# Altium footprint library Footprints.PcbLib: 320 footprints (part 20 of 20)
Each footprint in its own frame and in the unit in brackets; x right, y up, seen from the top. Pads: shape width x height; smd on the part's side, far side on the other; paste and mask are expansions set on the pad; w line width, h text height; cw(c..) or ccw(c..) is an arc to the next point about the centre after c.
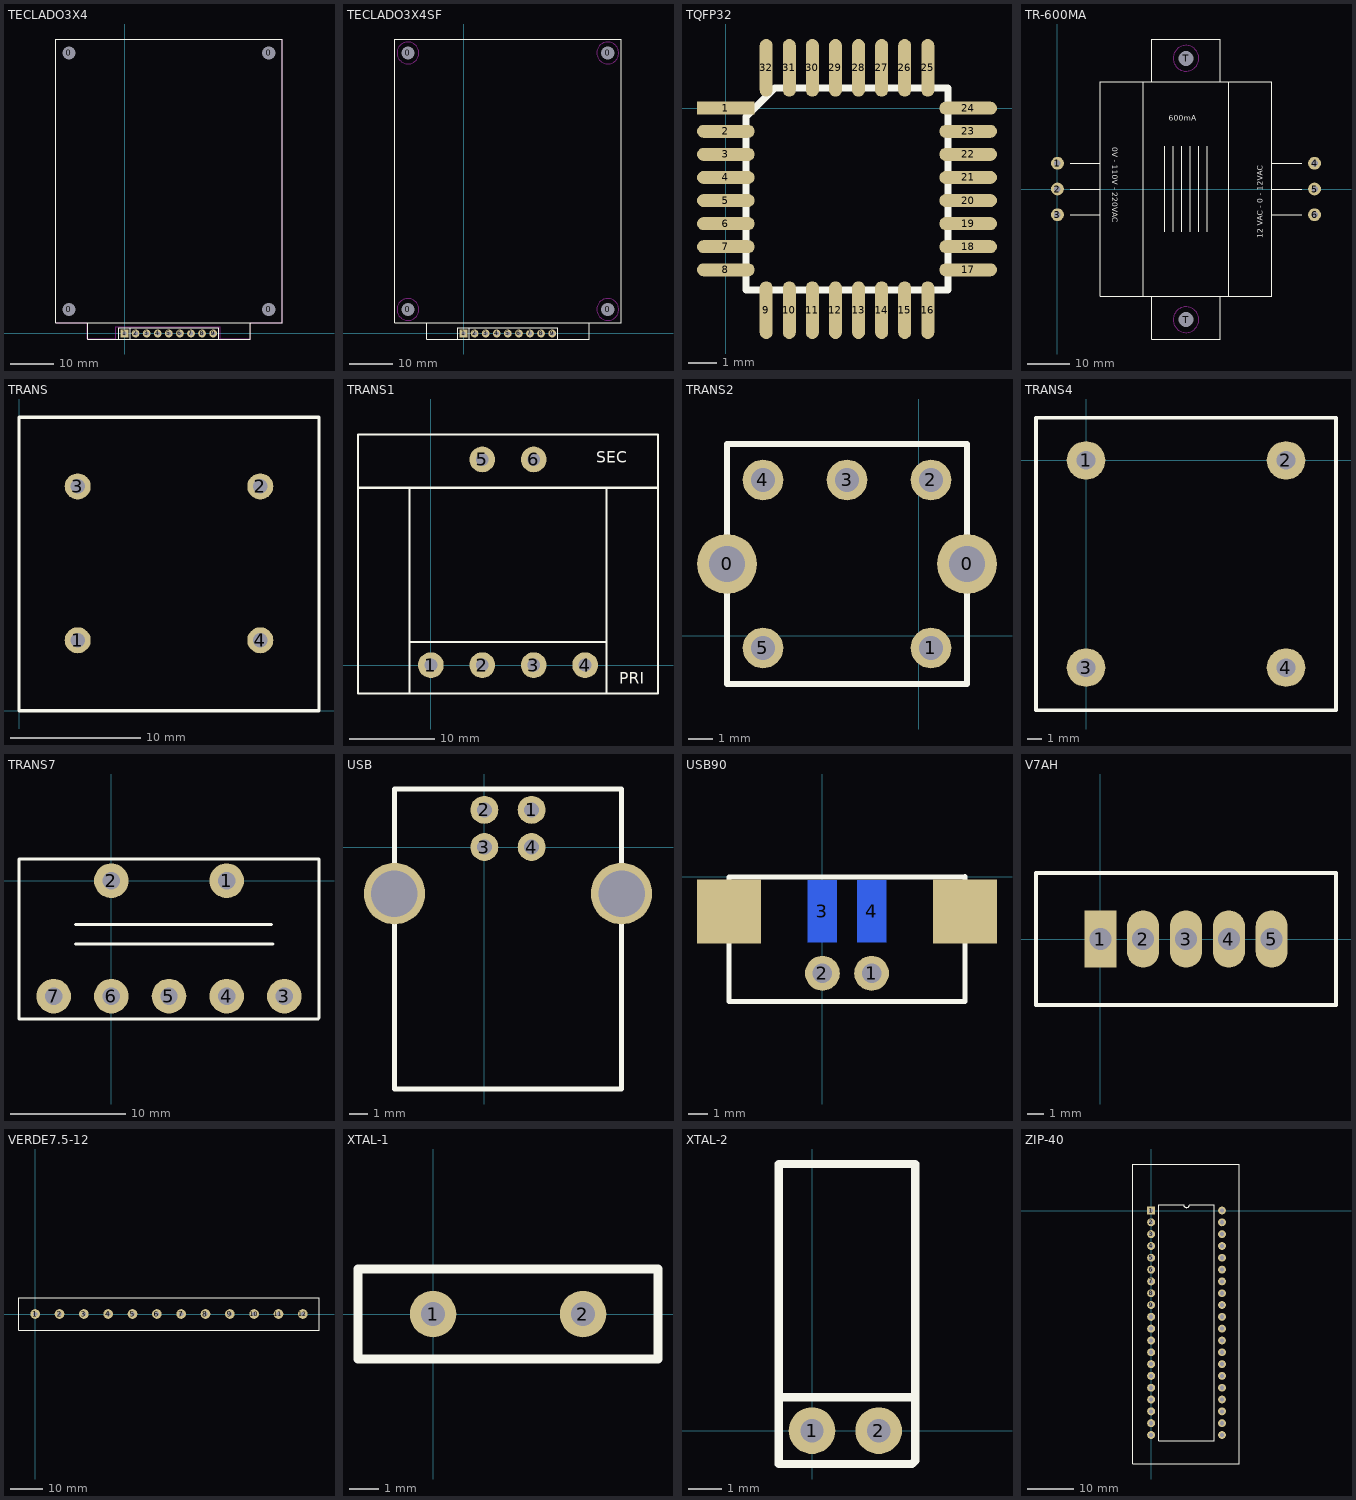
[diagram p19: the footprints below, top view; thin cyan lines are the x and y axes]

## TECLADO3X4 [mm]
pads (13):
  round 2.5 hole 3: 0(-12.74,5.5) 0(-12.74,64.3) 0(33.06,5.5) 0(33.06,64.3)
  rect 1.8x1.8 hole 1: 1(0,0)
  round 1.8 hole 1: 2(2.54,0) 3(5.08,0) 4(7.62,0) 5(10.16,0) 6(12.7,0) 7(15.24,0) 8(17.78,0) 9(20.32,0)
Top Overlay:
  lines w0.254: -8.47,2.47 -8.47,-1.27 -1.27,-1.27 ; 1.27,-1.27 1.27,1.27 ; 20.4,-1.27 28.87,-1.27 28.87,2.47 ; -1.27,-1.27 21.59,-1.27 21.59,1.27 -1.27,1.27 -1.27,-1.27 ; -15.8,2.5 36.2,2.5 36.2,67.5 -15.8,67.5 -15.8,2.5
Keep-Out Layer:
  lines w0.254: -15.8,2.5 -8.5,2.5 -8.5,-1.2 -2,-1.2 -2,1.5 22,1.5 22,-1.2 28.9,-1.2 28.9,2.5 36.2,2.5 36.2,67.5 -15.8,67.5 -15.8,2.5

## TECLADO3X4SF [mm]
pads (13):
  round 2.5 hole 3: 0(-12.74,5.5) 0(-12.74,64.3) 0(33.06,5.5) 0(33.06,64.3)
  rect 1.8x1.8 hole 1: 1(0,0)
  round 1.8 hole 1: 2(2.54,0) 3(5.08,0) 4(7.62,0) 5(10.16,0) 6(12.7,0) 7(15.24,0) 8(17.78,0) 9(20.32,0)
Top Overlay:
  lines w0.254: -8.47,2.47 -8.47,-1.27 -1.27,-1.27 ; 1.27,-1.27 1.27,1.27 ; 20.4,-1.27 28.87,-1.27 28.87,2.47 ; -1.27,-1.27 -1.27,1.27 21.59,1.27 21.59,-1.27 -1.27,-1.27 ; -15.8,2.5 -15.8,67.5 36.2,67.5 36.2,2.5 -15.8,2.5
Keep-Out Layer:
  circle w0.254: c-12.74,64.3 r2.5
  circle w0.254: c33.06,64.3 r2.5
  circle w0.254: c33.06,5.5 r2.5
  circle w0.254: c-12.74,5.5 r2.5

## TQFP32 [mm]
pads (32):
  rect 2x0.45 smd: 1(0,0)
  oval 2x0.45 smd: 2(0,-0.8) 3(0,-1.6) 4(0,-2.4) 5(0,-3.2) 6(0,-4) 7(0,-4.8) 8(0,-5.6) 17(8.4,-5.6) 18(8.4,-4.8) 19(8.4,-4) 20(8.4,-3.2) 21(8.4,-2.4) 22(8.4,-1.6) 23(8.4,-0.8) 24(8.4,0)
  oval 0.45x2 smd: 9(1.4,-7) 10(2.2,-7) 11(3,-7) 12(3.8,-7) 13(4.6,-7) 14(5.4,-7) 15(6.2,-7) 16(7,-7) 25(7,1.4) 26(6.2,1.4) 27(5.4,1.4) 28(4.6,1.4) 29(3.8,1.4) 30(3,1.4) 31(2.2,1.4) 32(1.4,1.4)
Top Overlay:
  lines w0.254: 0.7,-0.3 0.7,-6.3 7.7,-6.3 7.7,0.7 1.7,0.7 0.7,-0.3 ; 0.7,-0.3 0.7,-0.3

## TR-600MA [mm]
pads (8):
  round 3 hole 1.5: 1(0,6) 2(0,0) 3(0,-6) 4(60,6) 5(60,0) 6(60,-6)
  round 3 hole 3.5: T(30,-30.5) T(30,30.5)
Top Overlay:
  lines w0.254: 3,-6 9.9,-6 ; 3,0 10,0 ; 3,6 10,6 ; 20,-25 20,25 ; 22,-25 22,-35 38,-35 38,-25 ; 22,25 22,35 38,35 38,25 ; 25,-10 25,10 ; 27,-10 27,10 ; 29,-10 29,10 ; 31,-10 31,10 ; 33,-10 33,10 ; 35,-10 35,10 ; 40,-25 40,25 ; 50,-6 57,-6 ; 50,0 57,0 ; 50.1,6 57,6 ; 10,-25 50,-25 50,25 10,25 10,-25
  text "600mA" at 26,15.9 h1.3
  text "12 VAC - 0 - 12VAC" at 47.9,-11.5 h1.3
  text "0V - 110V - 220VAC" at 12.8,9.7 h1.3
Keep-Out Layer:
  circle w0.254: c30,30.5 r3
  circle w0.254: c30,-30.5 r3

## TRANS [mm]
pads (4):
  round 2 hole 1.1: 1(4.5,5.4) 2(18.5,17.2) 3(4.5,17.2) 4(18.5,5.4)
Top Overlay:
  lines w0.254: 0,0 23,0 23,22.5 0,22.5 0,0

## TRANS1 [mm]
pads (6):
  round 3 hole 1.5: 1(0,0) 2(6,0) 3(12,0) 4(18,0) 5(6,24) 6(12,24)
Top Overlay:
  lines w0.254: -8.5,20.7 26.5,20.7 ; -2.5,-3.3 -2.5,20.7 ; -2.5,2.7 20.5,2.7 ; 20.5,-3.3 20.5,20.7 ; -8.5,-3.3 26.5,-3.3 26.5,26.9 -8.5,26.9 -8.5,-3.3
  text "PRI" at 22,-2.2 h1.3
  text "SEC" at 19.3,23.6 h1.3

## TRANS2 [mm]
pads (7):
  round 2.5 hole 1.5: 0(-8,3) 0(2,3)
  round 1.7 hole 1: 1(0.5,-0.5) 2(0.5,6.5) 3(-3,6.5) 4(-6.5,6.5) 5(-6.5,-0.5)
Top Overlay:
  lines w0.254: -8,-2 2,-2 2,8 -8,8 -8,-2

## TRANS4 [mm]
pads (4):
  round 2.7 hole 1.3: 1(0,0) 2(14,0) 3(0,-14.5) 4(14,-14.5)
Top Overlay:
  lines w0.254: -3.5,-17.5 17.5,-17.5 17.5,3 -3.5,3 -3.5,-17.5

## TRANS7 [mm]
pads (7):
  round 3 hole 1.5: 1(10,0) 2(0,0) 3(15,-10) 4(10,-10) 5(5,-10) 6(0,-10) 7(-5,-10)
Top Overlay:
  lines w0.254: -8,1.8 -7.9,1.9 18,1.9 18,-11.9 17.9,-12 -8,-12 -8,1.9 ; -3.1,-5.5 14,-5.5 ; -3.1,-3.8 13.9,-3.8

## USB [mm]
pads (6):
  round 1.5 hole 0.8: 1(2.54,2) 2(0,2) 3(0,0) 4(2.54,0)
  round 3.3 hole 2.5: ""(-4.83,-2.5) ""(7.37,-2.5)
Top Overlay:
  lines w0.254: 7.37,-0.04 7.37,3.12 -4.83,3.12 -4.83,-13 7.37,-13 7.37,0

## USB90 [mm]
pads (6):
  round 1.8 hole 1: 1(2.54,-5) 2(0,-5)
  rect 1.5x3.2 smd far side: 3(0,-1.8) 4(2.54,-1.8)
  rect 3.3x3.3 smd: ""(-4.83,-1.8) ""(7.37,-1.8)
Top Overlay:
  lines w0.254: 7.37,-0.04 7.37,-0.02 -4.83,-0.02 -4.83,-6.45 7.37,-6.45 7.37,0

## V7AH [mm]
pads (5):
  rect 1.9x3.4 hole 1.3: 1(0,0)
  oval 1.9x3.4 hole 1.3: 2(2.54,0) 3(5.08,0) 4(7.62,0) 5(10.16,0)
Top Overlay:
  lines w0.254: -3.81,-3.91 13.97,-3.91 13.97,3.91 -3.81,3.91 -3.81,-3.91

## VERDE7.5-12 [mm]
pads (12):
  round 3 hole 1.3: 1(0,0) 2(7.5,0) 3(15,0) 4(22.5,0) 5(30,0) 6(37.5,0) 7(45,0) 8(52.5,0) 9(60,0) 10(67.5,0) 11(75,0) 12(82.5,0)
Top Overlay:
  lines w0.254: -5,-5 -5,0 -5,5 87.5,5 87.5,-5 -5,-5

## XTAL-1 [mil]
pads (2):
  round 62 hole 31.5: 1(0,0) 2(200,0)
Top Overlay:
  lines w12: -100,-60 300,-60 300,60 -100,60 -100,-60

## XTAL-2 [mm]
pads (2):
  round 1.4 hole 0.7: 1(0,0) 2(2,0)
Top Overlay:
  lines w0.254: -1,1 3,1 ; -1,-1 3,-1 3.1,-0.9 3.1,8 -1,8 -1,-1

## ZIP-40 [mm]
pads (40):
  rect 1.7x1.7 hole 0.9: 1(0,0)
  round 1.7 hole 0.9: 2(0,-2.54) 3(0,-5.08) 4(0,-7.62) 5(0,-10.16) 6(0,-12.7) 7(0,-15.24) 8(0,-17.78) 9(0,-20.32) 10(0,-22.86) 11(0,-25.4) 12(0,-27.94) 13(0,-30.48) 14(0,-33.02) 15(0,-35.56) 16(0,-38.1) 17(0,-40.64) 18(0,-43.18) 19(0,-45.72) 20(0,-48.26) 21(15.24,-48.26) 22(15.24,-45.72) 23(15.24,-43.18) 24(15.24,-40.64) 25(15.24,-38.1) 26(15.24,-35.56) 27(15.24,-33.02) 28(15.24,-30.48) 29(15.24,-27.94) 30(15.24,-25.4) 31(15.24,-22.86) 32(15.24,-20.32) 33(15.24,-17.78) 34(15.24,-15.24) 35(15.24,-12.7) 36(15.24,-10.16) 37(15.24,-7.62) 38(15.24,-5.08) 39(15.24,-2.54) 40(15.24,0)
Top Overlay:
  lines w0.2: 1.685,-49.53 13.555,-49.53 13.555,1.27 8.255,1.27 cw(c7.62,1.27) 6.985,1.27 1.685,1.27 1.685,-49.53
  lines w0.254: -4,-54.5 19,-54.5 19,10 -4,10 -4,-54.5